# Altium footprint library FootPrintLib_10.PcbLib: 270 footprints (part 2 of 17)
Each footprint in its own frame and in the unit in brackets; x right, y up, seen from the top. Pads: shape width x height; smd on the part's side, far side on the other; paste and mask are expansions set on the pad; w line width, h text height; cw(c..) or ccw(c..) is an arc to the next point about the centre after c.
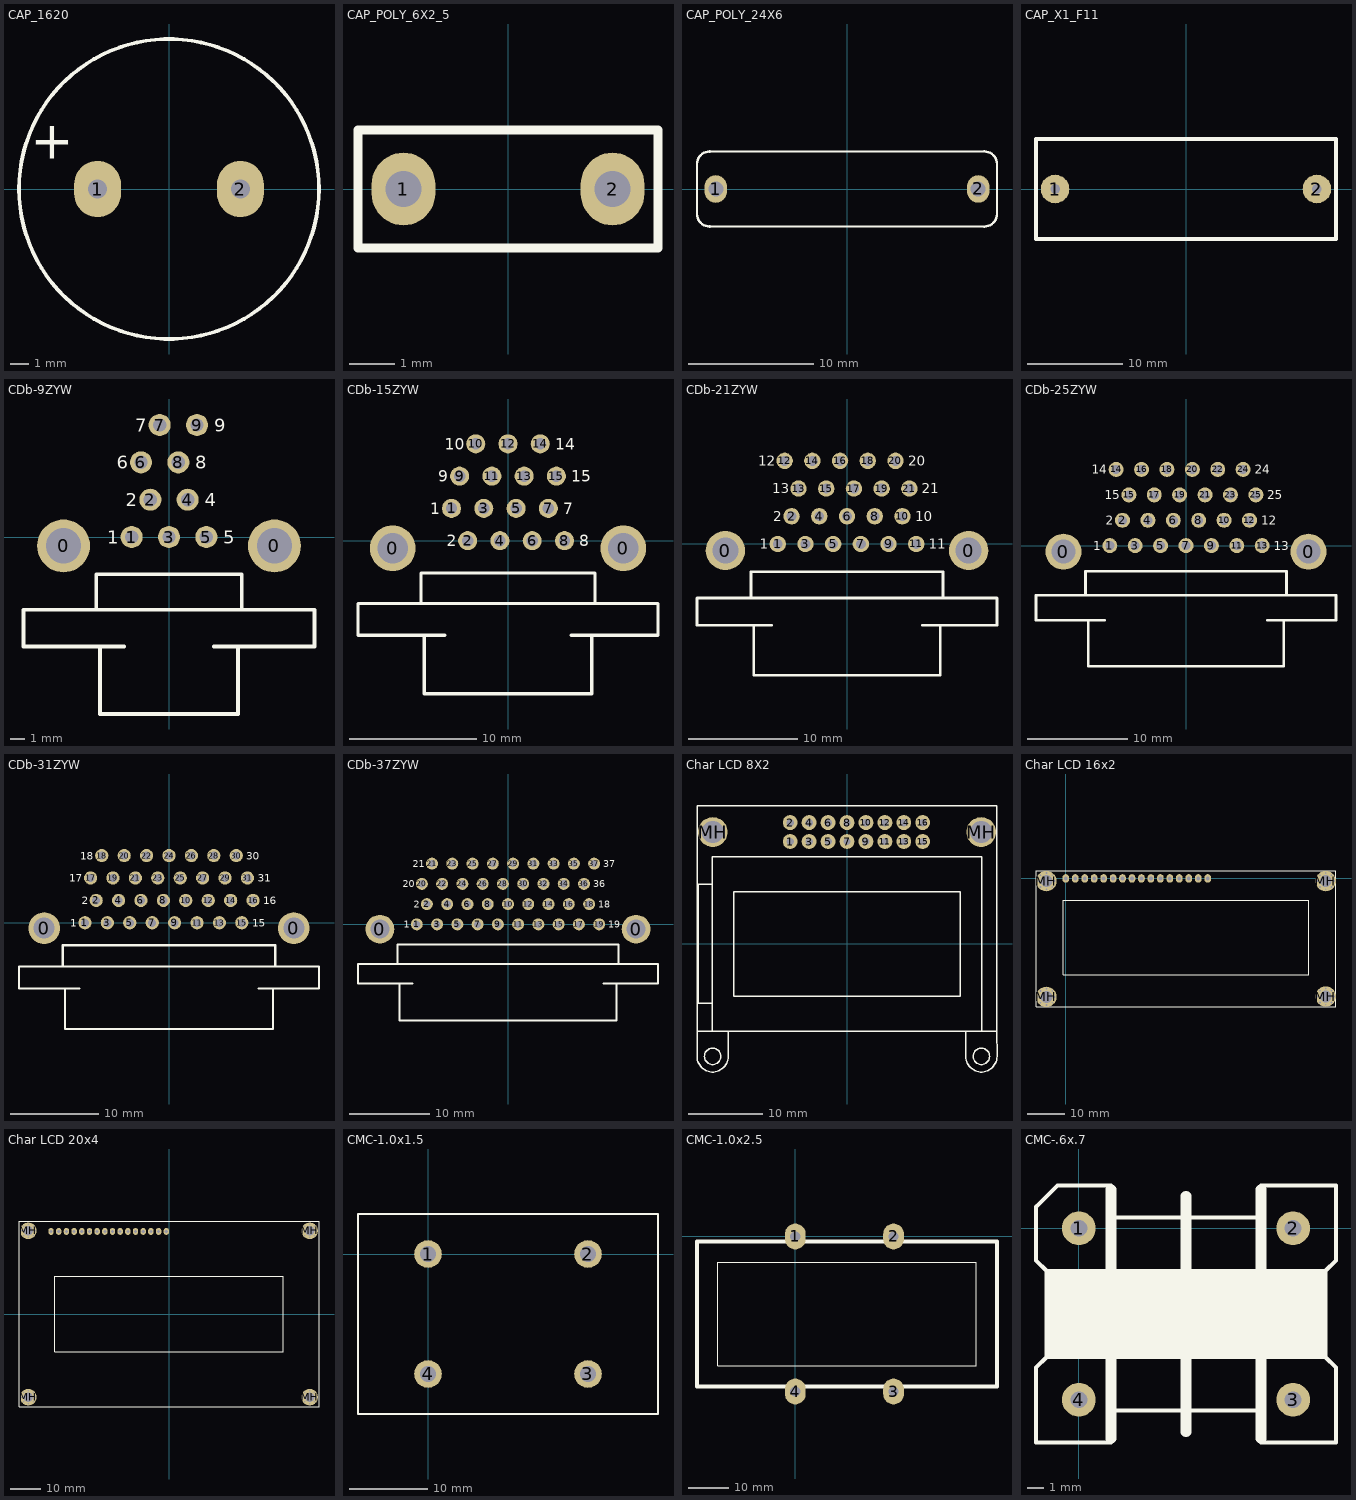
[diagram p1: the footprints below, top view; thin cyan lines are the x and y axes]

## CAP_1620 [mm]
height 20
pads (2):
  oval 2.5x3 hole 1: 1(-3.81,0) 2(3.81,0)
Top Overlay:
  circle w0.2: c0,0 r8
  text "+" at -5.073,3.355 h2
3D body "User Library-Cap electrolitic radial 16x26.STEP": height 26.8, standoff -0.7, extent -7.997,-7.982 7.997,7.998

## CAP_POLY_6X2_5 [mm] "CAP, FILM MKT, 6.3X2.4mm, pitch: 4.7mm"
height 8.5
pads (2):
  oval 1.4x1.6 hole 0.8 mask+0.075: 1(-2.3,0) 2(2.3,0)
Top Overlay:
  lines w0.2: -3.3,-1.3 -3.3,1.3 3.3,1.3 3.3,-1.3 -3.3,-1.3
3D body "cap.STEP": height 6.34, standoff -1.96, extent -3.15,-1.2 3.15,1.2

## CAP_POLY_24X6 [mm] "CAP, POLYESTER, 23.8X12mm pitch: 20.0mm, 100nF 630V"
pads (2):
  oval 1.8x2.2 hole 1.2: 1(-10.5,0) 2(10.5,0)
Top Overlay:
  lines w0.2: -12,-2.1 -12,-1.1 -12,2.1 ; -12,-2 ccw(c-11,-2) -11,-3 11,-3 ccw(c11,-2) 12,-2 12,2.1 ; -12,2 cw(c-11,2) -11,3 11,3 cw(c11,2) 12,2
3D body "Cap 330n - 400V Poly_2009.STEP": height 10.92, standoff -3, extent -11.888,-2.85 11.862,2.901

## CAP_X1_F11 [mm] "EMI suppressor, class X1, metallized polypropylene"
height 20.5
pads (2):
  round 3 hole 1: 1(-13.75,0) 2(13.75,0)
Top Overlay:
  lines w0.381: -15.75,-5.25 15.75,-5.25 15.75,5.25 -15.75,5.25 -15.75,-5.25

## CDb-9ZYW [mm] "CDb Right Angle PCB Male 9-Pin"
height 5.4
pads (11):
  round 3.6 hole 2.4: 0(-7.175,-0.6) 0(7.175,-0.6)
  round 1.5 hole 0.9: 1(-2.54,0) 2(-1.27,2.54) 3(0,0) 4(1.27,2.54) 5(2.54,0) 6(-1.905,5.08) 7(-0.635,7.62) 8(0.635,5.08) 9(1.905,7.62)
Top Overlay:
  lines w0.254: -4.95,-4.94 -4.95,-2.54 0,-2.54 4.95,-2.54 4.95,-4.94 ; -4.69,-7.44 -4.69,-12.04 0,-12.04 4.69,-12.04 4.69,-7.44 ; -3.05,-7.44 -9.9,-7.44 -9.9,-4.94 0,-4.94 9.9,-4.94 9.9,-7.44 3.05,-7.44
  text "1" at -4.2,-0.447 h0.89
  text "5" at 3.7,-0.447 h0.89
  text "4" at 2.43,2.093 h0.89
  text "2" at -2.93,2.093 h0.89
  text "6" at -3.565,4.633 h0.89
  text "7" at -2.295,7.173 h0.89
  text "8" at 1.795,4.633 h0.89
  text "9" at 3.065,7.173 h0.89

## CDb-15ZYW [mm] "CDb Right Angle PCB Male 15-Pin"
height 5.4
pads (17):
  round 3.6 hole 2.4: 0(-9.08,-0.6) 0(9.08,-0.6)
  round 1.5 hole 0.9: 1(-4.445,2.54) 2(-3.175,0) 3(-1.905,2.54) 4(-0.635,0) 5(0.635,2.54) 6(1.905,0) 7(3.175,2.54) 8(4.445,0) 9(-3.81,5.08) 10(-2.54,7.62) 11(-1.27,5.08) 12(0,7.62) 13(1.27,5.08) 14(2.54,7.62) 15(3.81,5.08)
Top Overlay:
  lines w0.254: -6.855,-4.94 -6.855,-2.54 0,-2.54 6.855,-2.54 6.855,-4.94 ; -6.595,-7.44 -6.595,-12.04 0,-12.04 6.595,-12.04 6.595,-7.44 ; -4.955,-7.44 -11.805,-7.44 -11.805,-4.94 0,-4.94 11.805,-4.94 11.805,-7.44 4.955,-7.44
  text "2" at -4.835,-0.447 h0.89
  text "8" at 5.605,-0.447 h0.89
  text "7" at 4.335,2.093 h0.89
  text "1" at -6.105,2.093 h0.89
  text "9" at -5.47,4.633 h0.89
  text "10" at -4.962,7.173 h0.89
  text "15" at 4.97,4.633 h0.89
  text "14" at 3.7,7.173 h0.89

## CDb-21ZYW [mm] "CDb Right Angle PCB Male 21-Pin"
height 5.4
pads (23):
  round 3.6 hole 2.4: 0(-11.15,-0.6) 0(11.15,-0.6)
  round 1.5 hole 0.9: 1(-6.35,0) 2(-5.08,2.54) 3(-3.81,0) 4(-2.54,2.54) 5(-1.27,0) 6(0,2.54) 7(1.27,0) 8(2.54,2.54) 9(3.81,0) 10(5.08,2.54) 11(6.35,0) 12(-5.715,7.62) 13(-4.445,5.08) 14(-3.175,7.62) 15(-1.905,5.08) 16(-0.635,7.62) 17(0.635,5.08) 18(1.905,7.62) 19(3.175,5.08) 20(4.445,7.62) 21(5.715,5.08)
Top Overlay:
  lines w0.254: -8.8,-4.94 -8.8,-2.54 0,-2.54 8.8,-2.54 8.8,-4.94 ; -8.54,-7.44 -8.54,-12.04 0,-12.04 8.54,-12.04 8.54,-7.44 ; -6.9,-7.44 -13.75,-7.44 -13.75,-4.94 0,-4.94 13.75,-4.94 13.75,-7.44 6.9,-7.44
  text "20" at 5.605,7.173 h0.89
  text "21" at 6.875,4.633 h0.89
  text "12" at -8.137,7.173 h0.89
  text "2" at -6.74,2.093 h0.89
  text "10" at 6.24,2.093 h0.89
  text "11" at 7.51,-0.447 h0.89
  text "1" at -8.01,-0.447 h0.89
  text "13" at -6.867,4.633 h0.89

## CDb-25ZYW [mm] "CDb Right Angle PCB Male 25-Pin"
height 5.4
pads (27):
  round 3.6 hole 2.4: 0(-12.25,-0.6) 0(12.25,-0.6)
  round 1.5 hole 0.9: 1(-7.62,0) 2(-6.35,2.54) 3(-5.08,0) 4(-3.81,2.54) 5(-2.54,0) 6(-1.27,2.54) 7(0,0) 8(1.27,2.54) 9(2.54,0) 10(3.81,2.54) 11(5.08,0) 12(6.35,2.54) 13(7.62,0) 14(-6.985,7.62) 15(-5.715,5.08) 16(-4.445,7.62) 17(-3.175,5.08) 18(-1.905,7.62) 19(-0.635,5.08) 20(0.635,7.62) 21(1.905,5.08) 22(3.175,7.62) 23(4.445,5.08) 24(5.715,7.62) 25(6.985,5.08)
Top Overlay:
  lines w0.254: -10.05,-4.94 -10.05,-2.54 0,-2.54 10.05,-2.54 10.05,-4.94 ; -9.79,-7.44 -9.79,-12.04 0,-12.04 9.79,-12.04 9.79,-7.44 ; -8.15,-7.44 -15,-7.44 -15,-4.94 0,-4.94 15,-4.94 15,-7.44 8.15,-7.44
  text "24" at 6.875,7.173 h0.89
  text "25" at 8.145,4.633 h0.89
  text "14" at -9.407,7.173 h0.89
  text "2" at -8.01,2.093 h0.89
  text "12" at 7.51,2.093 h0.89
  text "13" at 8.78,-0.447 h0.89
  text "1" at -9.28,-0.447 h0.89
  text "15" at -8.137,4.633 h0.89

## CDb-31ZYW [mm] "CDb Right Angle PCB Male 31-Pin"
height 5.4
pads (33):
  round 3.6 hole 2.4: 0(-14.15,-0.6) 0(14.15,-0.6)
  round 1.5 hole 0.9: 1(-9.525,0) 2(-8.255,2.54) 3(-6.985,0) 4(-5.715,2.54) 5(-4.445,0) 6(-3.175,2.54) 7(-1.905,0) 8(-0.635,2.54) 9(0.635,0) 10(1.905,2.54) 11(3.175,0) 12(4.445,2.54) 13(5.715,0) 14(6.985,2.54) 15(8.255,0) 16(9.525,2.54) 17(-8.89,5.08) 18(-7.62,7.62) 19(-6.35,5.08) 20(-5.08,7.62) 21(-3.81,5.08) 22(-2.54,7.62) 23(-1.27,5.08) 24(0,7.62) 25(1.27,5.08) 26(2.54,7.62) 27(3.81,5.08) 28(5.08,7.62) 29(6.35,5.08) 30(7.62,7.62) 31(8.89,5.08)
Top Overlay:
  lines w0.254: -12.05,-4.94 -12.05,-2.54 0,-2.54 12.05,-2.54 12.05,-4.94 ; -11.79,-7.44 -11.79,-12.04 0,-12.04 11.79,-12.04 11.79,-7.44 ; -10.15,-7.44 -17,-7.44 -17,-4.94 0,-4.94 17,-4.94 17,-7.44 10.15,-7.44
  text "17" at -11.312,4.633 h0.89
  text "1" at -11.185,-0.447 h0.89
  text "2" at -9.915,2.093 h0.89
  text "18" at -10.042,7.173 h0.89
  text "30" at 8.78,7.173 h0.89
  text "31" at 10.05,4.633 h0.89
  text "16" at 10.685,2.093 h0.89
  text "15" at 9.415,-0.447 h0.89

## CDb-37ZYW [mm] "CDb Right Angle PCB Male 37-Pin"
height 5.4
pads (39):
  round 3.6 hole 2.4: 0(-16.05,-0.6) 0(16.05,-0.6)
  round 1.5 hole 0.9: 1(-11.43,0) 2(-10.16,2.54) 3(-8.89,0) 4(-7.62,2.54) 5(-6.35,0) 6(-5.08,2.54) 7(-3.81,0) 8(-2.54,2.54) 9(-1.27,0) 10(0,2.54) 11(1.27,0) 12(2.54,2.54) 13(3.81,0) 14(5.08,2.54) 15(6.35,0) 16(7.62,2.54) 17(8.89,0) 18(10.16,2.54) 19(11.43,0) 20(-10.795,5.08) 21(-9.525,7.62) 22(-8.255,5.08) 23(-6.985,7.62) 24(-5.715,5.08) 25(-4.445,7.62) 26(-3.175,5.08) 27(-1.905,7.62) 28(-0.635,5.08) 29(0.635,7.62) 30(1.905,5.08) 31(3.175,7.62) 32(4.445,5.08) 33(5.715,7.62) 34(6.985,5.08) 35(8.255,7.62) 36(9.525,5.08) 37(10.795,7.62)
Top Overlay:
  lines w0.254: -13.85,-4.94 -13.85,-2.54 0,-2.54 13.85,-2.54 13.85,-4.94 ; -13.59,-7.44 -13.59,-12.04 0,-12.04 13.59,-12.04 13.59,-7.44 ; -11.95,-7.44 -18.8,-7.44 -18.8,-4.94 0,-4.94 18.8,-4.94 18.8,-7.44 11.95,-7.44
  text "18" at 11.32,2.093 h0.89
  text "36" at 10.685,4.633 h0.89
  text "37" at 11.955,7.173 h0.89
  text "21" at -11.947,7.173 h0.89
  text "2" at -11.82,2.093 h0.89
  text "1" at -13.09,-0.447 h0.89
  text "20" at -13.217,4.633 h0.89
  text "19" at 12.59,-0.447 h0.89

## Char LCD 8X2 [mm] "LCD 8x2 , 16-Leads, Pitch 2.54mm"
height 12.8
pads (18):
  round 2 hole 1: 1(-7.62,13.73) 2(-7.62,16.27) 3(-5.08,13.73) 4(-5.08,16.27) 5(-2.54,13.73) 6(-2.54,16.27) 7(0,13.73) 8(0,16.27) 9(2.54,13.73) 10(2.54,16.27) 11(5.08,13.73) 12(5.08,16.27) 13(7.62,13.73) 14(7.62,16.27) 15(10.16,13.73) 16(10.16,16.27)
  round 4 hole 3: MH(-18,15) MH(18,15)
Top Overlay:
  circle w0.2: c-18.025,-15.1 r1.1
  circle w0.2: c18.025,-15.1 r1.1
  lines w0.2: -18.1,-11.7 -18.1,11.7 18.1,11.7 18.1,-11.7 ; -18.1,-8 -19.95,-8 -19.95,8 -18.1,8 ; -15.9,-11.7 -15.925,-15.1 cw(c-18.025,-15.1) -20.125,-15.1 -20.1,-11.7 ; 15.9,-11.7 15.925,-15.1 ccw(c18.025,-15.1) 20.125,-15.1 20.1,-11.7 ; -20.1,-11.7 20.1,-11.7 ; -20.1,-11.7 -20.1,18.5 20.1,18.5 20.1,-11.7 ; -15.2,-7 15.2,-7 15.2,7 -15.2,7 -15.2,-7
3D body "LCD 2x8.step": height 13.3, standoff -5.97, extent -20.125,-17.2 20.1,18.5

## Char LCD 16x2 [mm] "LCD 16x2 , 16-Leads, Pitch 2.54mm"
pads (52):
  oval 1.778x2.286 hole 1.016: 1(0,0) 2(2.54,0) 3(5.08,0) 4(7.62,0) 5(10.16,0) 6(12.7,0) 7(15.24,0) 8(17.78,0) 9(20.32,0) 10(22.86,0) 11(25.4,0) 12(27.94,0) 13(30.48,0) 14(33.02,0) 15(35.56,0) 16(38.1,0)
  round 0.6 hole 0.5: MH(-7.4,-31.8) MH(-7.4,-0.7) MH(-6.756,-33.356) MH(-6.756,-30.244) MH(-6.756,-2.256) MH(-6.756,0.856) MH(-5.2,-34) MH(-5.2,-29.6) MH(-5.2,-2.9) MH(-5.2,1.5) MH(-3.644,-33.356) MH(-3.644,-30.244) MH(-3.644,-2.256) MH(-3.644,0.856) MH(-3,-31.8) MH(-3,-0.7) MH(67.6,-31.7) MH(67.6,-0.7) MH(68.244,-33.256) MH(68.244,-30.144) MH(68.244,-2.256) MH(68.244,0.856) MH(69.8,-33.9) MH(69.8,-29.5) MH(69.8,-2.9) MH(69.8,1.5) MH(71.356,-33.256) MH(71.356,-30.144) MH(71.356,-2.256) MH(71.356,0.856) MH(72,-31.7) MH(72,-0.7)
  round 5.5 hole 3.2: MH(-5.2,-31.8) MH(-5.2,-0.7) MH(69.8,-31.7) MH(69.8,-0.7)
Top Overlay:
  lines w0.254: -7.992,-34.468 -7.992,2.032 72.508,2.032 72.508,-34.468 -7.992,-34.468 ; -0.7,-25.9 -0.7,-5.9 65.3,-5.9 65.3,-25.9 -0.7,-25.9
3D body "header16-15mm.STEP": height 18.03, standoff -2.54, extent -1.27,-1.27 39.37,1.27
3D body "My LCD.STEP": height 25.52, standoff 12.31, extent -7.992,-34.468 72.508,2.032
3D body "14801-15 H.STEP": height 18.71, standoff -3.71, extent -7.5,-3 -2.9,1.6
3D body "14801-15 H.STEP": height 18.71, standoff -3.71, extent -7.5,-34.1 -2.9,-29.5
3D body "14801-15 H.STEP": height 18.71, standoff -3.71, extent 67.5,-34 72.1,-29.4
3D body "14801-15 H.STEP": height 18.71, standoff -3.71, extent 67.5,-3 72.1,1.6

## Char LCD 20x4 [mm] "LCD 20x4 , 16-Leads, Pitch 2.54mm"
pads (52):
  oval 1.778x2.286 hole 1.016: 1(-39,27.3) 2(-36.46,27.3) 3(-33.92,27.3) 4(-31.38,27.3) 5(-28.84,27.3) 6(-26.3,27.3) 7(-23.76,27.3) 8(-21.22,27.3) 9(-18.68,27.3) 10(-16.14,27.3) 11(-13.6,27.3) 12(-11.06,27.3) 13(-8.52,27.3) 14(-5.98,27.3) 15(-3.44,27.3) 16(-0.9,27.3)
  round 1 hole 0.5: MH(-48.7,-27.5) MH(-48.7,27.5) MH(-48.056,-29.056) MH(-48.056,-25.944) MH(-48.056,25.944) MH(-48.056,29.056) MH(-46.5,-29.7) MH(-46.5,-25.3) MH(-46.5,25.3) MH(-46.5,29.7) MH(-44.944,-29.056) MH(-44.944,-25.944) MH(-44.944,25.944) MH(-44.944,29.056) MH(-44.3,-27.5) MH(-44.3,27.5) MH(44.3,-27.5) MH(44.3,27.5) MH(44.944,-29.056) MH(44.944,-25.944) MH(44.944,25.944) MH(44.944,29.056) MH(46.5,-29.7) MH(46.5,-25.3) MH(46.5,25.3) MH(46.5,29.7) MH(48.056,-29.056) MH(48.056,-25.944) MH(48.056,25.944) MH(48.056,29.056) MH(48.7,-27.5) MH(48.7,27.5)
  round 5.5 hole 3.2: MH(-46.5,-27.5) MH(-46.5,27.5) MH(46.5,-27.5) MH(46.5,27.5)
Top Overlay:
  lines w0.254: -49.6,-30.6 -49.6,30.6 49.6,30.6 49.6,-30.6 -49.6,-30.6 ; -37.8,-12.5 -37.8,12.5 37.8,12.5 37.8,-12.5 -37.8,-12.5
3D body "14801-15 H.STEP": height 18.71, standoff -3.71, extent 44.2,25.2 48.8,29.8
3D body "14801-15 H.STEP": height 18.71, standoff -3.71, extent 44.2,-29.8 48.8,-25.2
3D body "14801-15 H.STEP": height 18.71, standoff -3.71, extent -48.8,-29.8 -44.2,-25.2
3D body "header16-15mm.STEP": height 18.03, standoff -2.54, extent -40.27,26.03 0.37,28.57
3D body "User Library-LCD 20 x 4.STEP": height 26.17, standoff 15.07, extent -49,-30 49,30
3D body "14801-15 H.STEP": height 18.71, standoff -3.71, extent -48.8,25.2 -44.2,29.8

## CMC-1.0x1.5 [mm]
pads (4):
  round 3.5 hole 2: 1(0,0) 2(20.32,0) 3(20.32,-15.24) 4(0,-15.24)
Top Overlay:
  lines w0.254: -8.89,-20.32 -8.89,5.08 29.21,5.08 29.21,-20.32 -8.89,-20.32

## CMC-1.0x2.5 [mm]
pads (4):
  oval 5.08x6.35 hole 2.5: 1(0,0) 2(24.13,0) 3(24.13,-38.1) 4(0,-38.1)
Top Overlay:
  lines w0.254: -19.05,-31.75 -19.05,-6.35 44.45,-6.35 44.45,-31.75 -19.05,-31.75
  lines w1: -24.13,-36.83 49.53,-36.83 49.53,-1.27 -24.13,-1.27 -24.13,-36.83

## CMC-.6x.7 [mm]
pads (4):
  round 2 hole 1: 1(0,0) 2(12.7,0) 3(12.7,-10.16) 4(0,-10.16)
Top Overlay:
  rectangle: -1.905,-7.62 14.605,-2.54
  lines w0.254: 6.35,1.905 6.35,0.635 ; -1.905,-7.62 14.605,-7.62 ; -1.905,-7.62 -2.54,-8.255 -2.54,-12.7 1.905,-12.7 1.905,-10.795 10.795,-10.795 10.795,-12.7 15.24,-12.7 15.24,-8.255 14.605,-7.62 ; -1.905,-7.62 -1.905,-2.54 ; -1.905,-2.54 -2.54,-1.905 -2.54,1.27 -1.27,2.54 1.905,2.54 1.905,0.635 6.35,0.635 ; -1.905,-2.54 14.605,-2.54 ; 6.35,0.635 10.795,0.635 10.795,2.54 15.24,2.54 15.24,-1.905 14.605,-2.54 ; 14.605,-7.62 14.605,-2.54
  lines w0.635: 1.905,-12.446 1.905,2.286 ; 6.35,-12.065 6.35,1.905 ; 10.795,-12.446 10.795,2.286